# Altium footprint library cp-01.PcbLib: 47 footprints (part 1 of 3)
Each footprint in its own frame and in the unit in brackets; x right, y up, seen from the top. Pads: shape width x height; smd on the part's side, far side on the other; paste and mask are expansions set on the pad; w line width, h text height; cw(c..) or ccw(c..) is an arc to the next point about the centre after c.
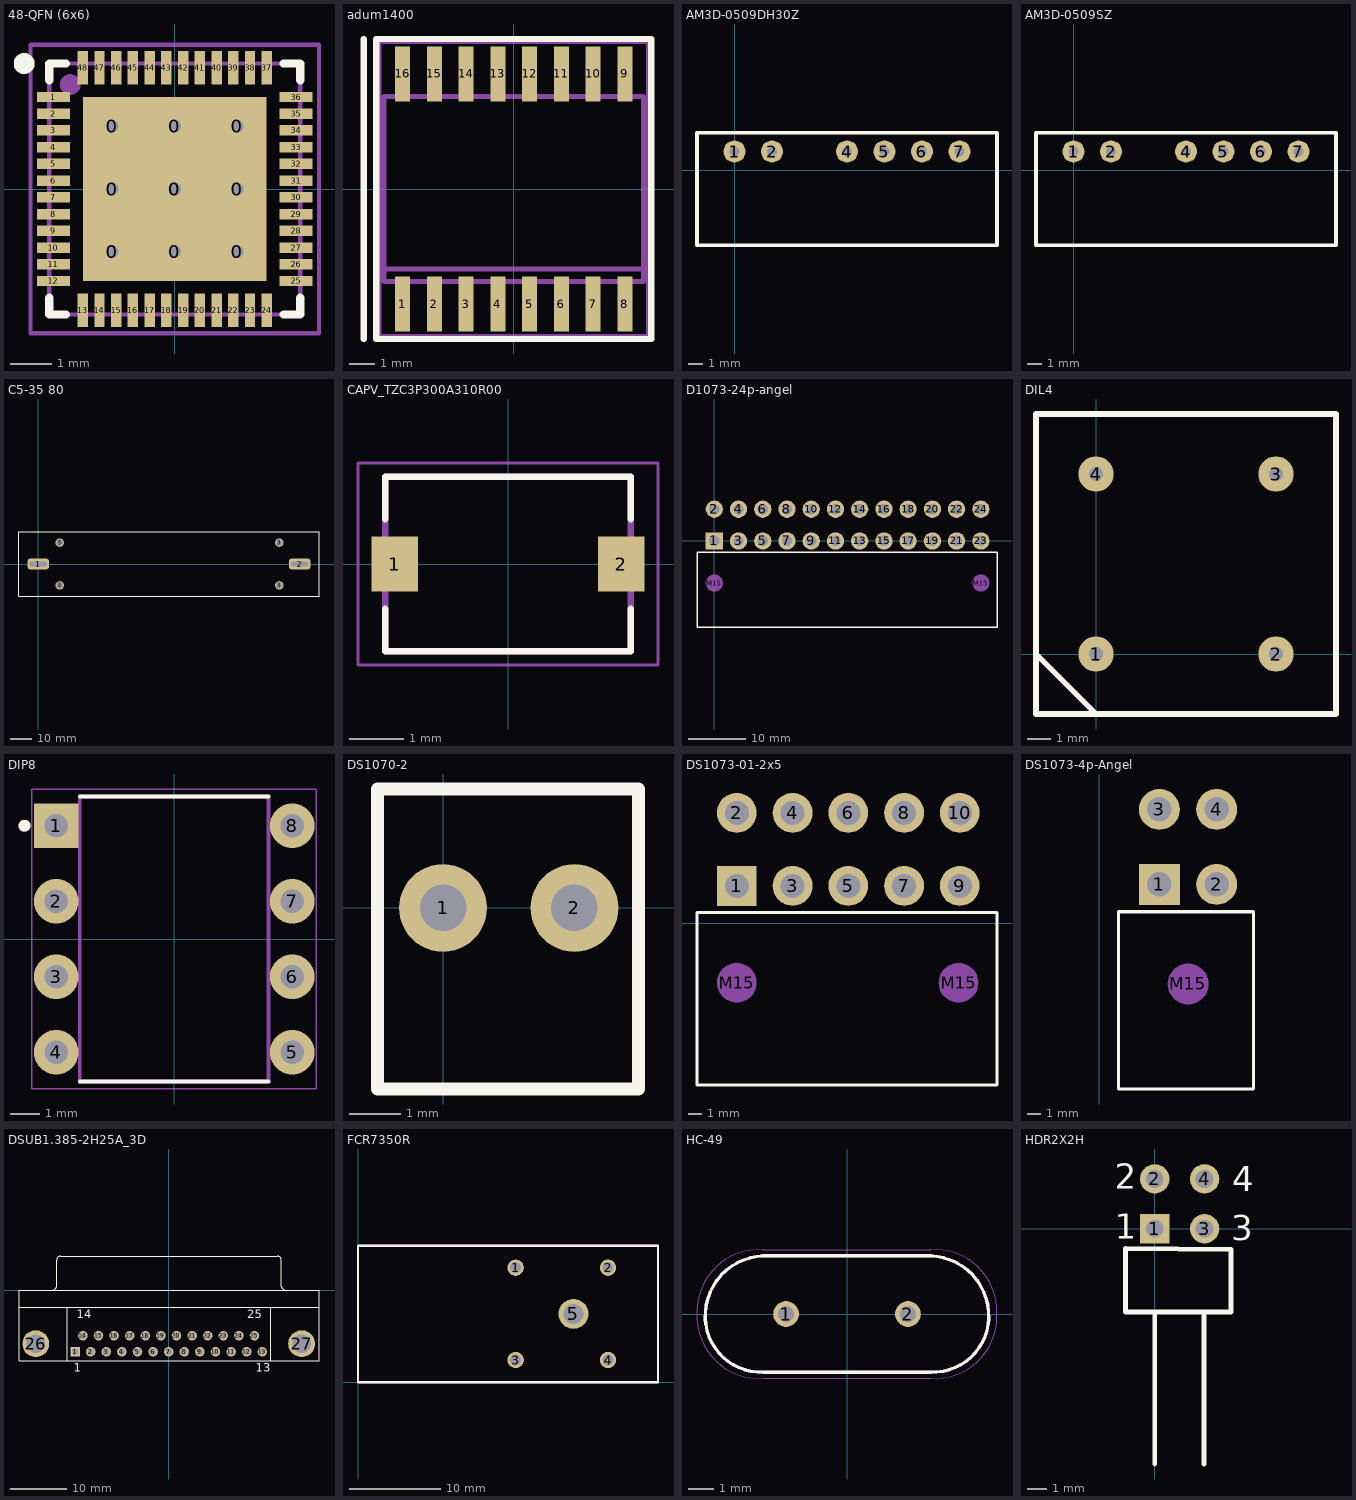
[diagram p0: the footprints below, top view; thin cyan lines are the x and y axes]

## 48-QFN (6x6) [mm] "6x6 mm, pitch 0.4 mm, power pad"
height 0.85
pads (59):
  round 0.7 hole 0.3: 0(-1.5,-1.5) 0(-1.5,0) 0(-1.5,1.5) 0(0,-1.5) 0(0,0) 0(0,1.5) 0(1.5,-1.5) 0(1.5,0) 0(1.5,1.5)
  rect 4.4x4.4 smd: 0(0,0)
  rect 0.8x0.25 smd: 1(-2.9,2.2) 2(-2.9,1.8) 3(-2.9,1.4) 4(-2.9,1) 5(-2.9,0.6) 6(-2.9,0.2) 7(-2.9,-0.2) 8(-2.9,-0.6) 9(-2.9,-1) 10(-2.9,-1.4) 11(-2.9,-1.8) 12(-2.9,-2.2) 25(2.9,-2.2) 26(2.9,-1.8) 27(2.9,-1.4) 28(2.9,-1) 29(2.9,-0.6) 30(2.9,-0.2) 31(2.9,0.2) 32(2.9,0.6) 33(2.9,1) 34(2.9,1.4) 35(2.9,1.8) 36(2.9,2.2)
  rect 0.25x0.8 smd: 13(-2.2,-2.9) 14(-1.8,-2.9) 15(-1.4,-2.9) 16(-1,-2.9) 17(-0.6,-2.9) 18(-0.2,-2.9) 19(0.2,-2.9) 20(0.6,-2.9) 21(1,-2.9) 22(1.4,-2.9) 23(1.8,-2.9) 24(2.2,-2.9) 37(2.2,2.9) 38(1.8,2.9) 39(1.4,2.9) 40(1,2.9) 41(0.6,2.9) 42(0.2,2.9) 43(-0.2,2.9) 44(-0.6,2.9) 45(-1,2.9) 46(-1.4,2.9) 47(-1.8,2.9) 48(-2.2,2.9)
  round 0.5 on Mech1 mask+0: ""(-2.5,2.5)
Top Overlay:
  circle w0.25: c-3.6,3 r0.125
  lines w0.2: -3,-2.6 -3,-3 -2.6,-3 ; -3,2.6 -3,3 -2.6,3 ; 2.6,-3 3,-3 3,-2.6 ; 2.6,3 3,3 3,2.6
Mechanical 1:
  lines w0.1: -3,-3 -3,3 3,3 3,-3 -3,-3
Mechanical 15:
  lines w0.1: -0.5,0 0.5,0 ; 0,-0.5 0,0.5 ; -3.45,-3.45 -3.45,3.45 3.45,3.45 3.45,-3.45 -3.45,-3.45
3D body "48-VFQFN (6x6).step": height 0.85, standoff 0, extent -3.02,-3.02 3.02,3.02

## adum1400 [mm]
pads (16):
  rect 0.6x2.2 smd: 1(-4.445,-4.6) 2(-3.175,-4.6) 3(-1.905,-4.6) 4(-0.635,-4.6) 5(0.635,-4.6) 6(1.905,-4.6) 7(3.175,-4.6) 8(4.445,-4.6) 9(4.445,4.6) 10(3.175,4.6) 11(1.905,4.6) 12(0.635,4.6) 13(-0.635,4.6) 14(-1.905,4.6) 15(-3.175,4.6) 16(-4.445,4.6)
Top Overlay:
  lines w0.254: -6,-6 -6,6 ; -5.5,-6 5.5,-6 5.5,6 -5.5,6 -5.5,-6
Mechanical 13:
  region: -4.2,-5.324 -4.694,-5.324 -4.694,-3.8 -4.2,-3.8
  region: -2.93,-5.328 -3.425,-5.328 -3.425,-3.8 -2.93,-3.8
  region: -1.66,-5.326 -2.153,-5.326 -2.153,-3.8 -1.66,-3.8
  region: -0.39,-5.328 -0.881,-5.328 -0.881,-3.8 -0.39,-3.8
  region: 0.88,-5.325 0.39,-5.325 0.39,-3.8 0.88,-3.8
  region: 2.15,-5.329 1.663,-5.329 1.663,-3.8 2.15,-3.8
  region: 3.42,-5.328 2.934,-5.328 2.934,-3.8 3.42,-3.8
  region: 4.69,-5.323 4.203,-5.323 4.203,-3.8 4.69,-3.8
  region: 4.69,3.807 4.208,3.807 4.208,5.32 4.69,5.32
  region: 3.42,3.807 2.935,3.807 2.935,5.32 3.42,5.32
  region: 2.15,3.807 1.663,3.807 1.663,5.32 2.15,5.32
  region: 0.88,3.805 0.39,3.805 0.39,5.32 0.88,5.32
  region: -0.39,3.805 -0.881,3.805 -0.881,5.32 -0.39,5.32
  region: -1.66,3.804 -2.152,3.804 -2.152,5.32 -1.66,5.32
  region: -2.93,3.8 -3.42,3.8 -3.42,5.32 -2.93,5.32
  region: -4.2,3.802 -4.693,3.802 -4.693,5.32 -4.2,5.32
  lines w0.203: -5.19,-3.2 -5.19,-3.7 5.19,-3.7 5.19,-3.2 ; -5.19,-3.2 -5.19,3.7 5.19,3.7 5.19,-3.2 ; -5.19,-3.2 5.19,-3.2
Mechanical 15:
  lines w0.2: -5.395,-5.9 5.395,-5.9 5.395,5.9 -5.395,5.9 -5.395,-5.9
3D body "ADUM1400.STEP": height 2.64, standoff 0, extent -6.4,-5.15 6.4,5.15

## AM3D-0509DH30Z [mm]
pads (6):
  round 1.5 hole 0.7: 1(0,1.27) 2(2.54,1.27) 4(7.62,1.27) 5(10.16,1.27) 6(12.7,1.27) 7(15.24,1.27)
Top Overlay:
  lines w0.254: -2.54,-5.08 -2.54,2.54 17.78,2.54 17.78,-5.08 -2.54,-5.08

## AM3D-0509SZ [mm]
pads (6):
  round 1.5 hole 0.7: 1(0,1.27) 2(2.54,1.27) 4(7.62,1.27) 5(10.16,1.27) 6(12.7,1.27) 7(15.24,1.27)
Top Overlay:
  lines w0.254: -2.54,-5.08 -2.54,2.54 17.78,2.54 17.78,-5.08 -2.54,-5.08

## C5-35 80 [mm]
pads (6):
  rrect50% 10x5 hole 2 slot 8 at 0 deg: 1(0,0) 2(122,0)
  round 4 hole 3.2: 3(10,-10) 3(10,10) 3(112.5,-10) 3(112.5,10)
Top Overlay:
  lines w0.254: -9,-15 131,-15 131,15 -9,15 -9,-15
3D body "С5-35В 80 1.stp": height 30, standoff -15, extent -9,-15 131,15

## CAPV_TZC3P300A310R00 [mm]
pads (2):
  rect 0.85x1 smd: 1(-2.075,0) 2(2.075,0)
Top Overlay:
  lines w0.127: -2.25,-0.82 -2.25,-1.6 2.25,-1.6 2.25,-0.82 ; -2.25,0.82 -2.25,1.6 2.25,1.6 2.25,0.82
Mechanical 13:
  lines w0.127: -2.25,-1.6 2.25,-1.6 2.25,1.6 -2.25,1.6 -2.25,-1.6
Mechanical 15:
  lines w0.05: -2.75,-1.85 -2.75,1.85 2.75,1.85 2.75,-1.85 -2.75,-1.85
3D body "User Library-TZC3P300A110R00.STEP": height 1.6, standoff 0, extent -2.25,-1.6 2.25,1.6

## D1073-24p-angel [mm]
pads (26):
  rect 3x3 hole 1.8: 1(0,0)
  round 3 hole 1.8: 2(0,5.5) 3(4.2,0) 4(4.2,5.5) 5(8.4,0) 6(8.4,5.5) 7(12.6,0) 8(12.6,5.5) 9(16.8,0) 10(16.8,5.5) 11(21,0) 12(21,5.5) 13(25.2,0) 14(25.2,5.5) 15(29.4,0) 16(29.4,5.5) 17(33.6,0) 18(33.6,5.5) 19(37.8,0) 20(37.8,5.5) 21(42,0) 22(42,5.5) 23(46.2,0) 24(46.2,5.5)
  round 3 on Mech13: M15(0,-7.3) M15(46.2,-7.3)
Top Overlay:
  lines w0.254: -3,-15 49,-15 49,-2 -3,-2 -3,-15
3D body "026013126.stp": height 11.4, standoff -3.6, extent -2.7,-13.735 49.3,6.2

## DIL4 [mm]
pads (4):
  round 1.5 hole 0.6: 1(0,0) 2(7.62,0) 3(7.62,7.62) 4(0,7.62)
Top Overlay:
  lines w0.254: -2.54,0 0,-2.54 ; -2.54,-2.54 -2.54,10.16 10.16,10.16 10.16,-2.54 -2.54,-2.54

## DIP8 [mm]
pads (8):
  rect 1.5x1.5 hole 0.78: 1(-3.97,3.81)
  round 1.5 hole 0.78: 2(-3.97,1.27) 3(-3.97,-1.27) 4(-3.97,-3.81) 5(3.97,-3.81) 6(3.97,-1.27) 7(3.97,1.27) 8(3.97,3.81)
Top Overlay:
  circle w0.2: c-5.035,3.81 r0.1
  lines w0.127: -3.175,-4.795 3.175,-4.795 ; -3.175,4.795 3.175,4.795
Mechanical 13:
  circle w0.2: c-5.035,3.81 r0.1
  lines w0.127: -3.175,-4.795 3.175,-4.795 3.175,4.795 -3.175,4.795 -3.175,-4.795
Mechanical 15:
  lines w0.05: -4.785,-5.045 4.785,-5.045 4.785,5.045 -4.785,5.045 -4.785,-5.045
3D body "DIP8.STEP": height 6.08, standoff -2.81, extent -3.937,-4.819 3.937,4.769

## DS1070-2 [mm]
pads (2):
  round 1.7 hole 0.9: 1(0,0) 2(2.54,0)
Top Overlay:
  lines w0.254: -1.265,-3.5 -1.265,2.3 3.775,2.3 3.775,-3.5 -1.265,-3.5
3D body "User Library-DS1070-2 (WF-2 CONNFLY).STEP": height 11.4, standoff -3.3, extent -1.24,-3.5 3.84,2.4

## DS1073-01-2x5 [mm]
pads (12):
  rect 3x3 hole 1.8: 1(-28.8,2.8)
  round 3 hole 1.8: 2(-28.8,8.3) 3(-24.6,2.8) 4(-24.6,8.3) 5(-20.4,2.8) 6(-20.4,8.3) 7(-16.2,2.8) 8(-16.2,8.3) 9(-12,2.8) 10(-12,8.3)
  round 3 on Mech13: M15(-28.8,-4.5) M15(-12.1,-4.5)
Top Overlay:
  lines w0.254: -31.8,-12.2 -9.2,-12.2 -9.2,0.8 -31.8,0.8 -31.8,-12.2
3D body "DS1073-01-2x5.stp": height 10, standoff -3.6, extent -31.5,-11.267 -9.7,8.667

## DS1073-4p-Angel [mm]
pads (5):
  rect 3x3 hole 1.8: 1(4.4,-8.5)
  round 3 hole 1.8: 2(8.6,-8.5) 3(4.4,-3) 4(8.6,-3)
  round 3 on Mech13: M15(6.5,-15.8)
Top Overlay:
  lines w0.254: 1.4,-23.5 11.3,-23.5 11.3,-10.5 1.4,-10.5 1.4,-23.5
3D body "026013128.stp": height 11.4, standoff -3.6, extent 1.7,-22.367 11.7,-2.433

## DSUB1.385-2H25A_3D [mm] "Connector; D Subminiature; 25 Position; Right Angle; Pitch 1.385 mm"
height 12.93
pads (27):
  rect 1.69x1.69 hole 1.09: 1(-16.566,-10.92)
  round 1.69 hole 1.09: 2(-13.805,-10.92) 3(-11.044,-10.92) 4(-8.283,-10.92) 5(-5.522,-10.92) 6(-2.761,-10.92) 7(0,-10.92) 8(2.761,-10.92) 9(5.522,-10.92) 10(8.283,-10.92) 11(11.044,-10.92) 12(13.805,-10.92) 13(16.566,-10.92) 14(-15.185,-8.08) 15(-12.424,-8.08) 16(-9.663,-8.08) 17(-6.902,-8.08) 18(-4.141,-8.08) 19(-1.38,-8.08) 20(1.381,-8.08) 21(4.142,-8.08) 22(6.903,-8.08) 23(9.664,-8.08) 24(12.425,-8.08) 25(15.186,-8.08)
  round 4.76 hole 3.26: 26(-23.526,-9.5) 27(23.526,-9.5)
Top Overlay:
  lines w0.2: -26.496,-3 26.604,-3 ; -20.541,0.005 ccw(c-20.541,0.7) -19.846,0.7 -19.846,5.3 ; -19.841,5.305 cw(c-19.146,5.305) -19.146,6 19.254,6 cw(c19.254,5.305) 19.949,5.305 ; -17.946,-12.5 -17.946,-3 ; 18.054,-12.5 18.054,-3 ; 19.954,5.3 19.954,0.7 ccw(c20.649,0.7) 20.649,0.005 ; -26.496,-12.5 26.604,-12.5 26.604,0 -26.496,0 -26.496,-12.5
  text "1" at -16.816,-14.475 h1.5
  text "13" at 15.441,-14.475 h1.5
  text "14" at -16.31,-4.975 h1.5
  text "25" at 13.936,-4.975 h1.5
3D body "618025231221.stp": height 12.27, standoff -4.27, extent -26.5,-12.5 26.6,5.9

## FCR7350R [mm]
pads (5):
  round 1.8 hole 1.2: 1(17.34,12.604) 2(27.5,12.604) 3(17.34,2.444) 4(27.5,2.444)
  round 3.3 hole 2.2: 5(23.7,7.524)
Top Overlay:
  lines w0.254: 0,0 33,0 33,15.015 0,15.015 0,0
Mechanical 13:
  lines w0.254: 0,0 0,15.015 33,15.015 33,0 0,0
3D body "FCR7350R--3DModel-STEP-56544.STEP": height 11.5, standoff -3.4, extent -3.82,1.5 29.18,13.5

## HC-49 [mm]
pads (2):
  round 1.03 hole 0.63: 1(-2.44,0) 2(2.44,0)
Top Overlay:
  lines w0.127: -5.675,-0.169 cw(c-3.26,-0.085) -3.344,2.33 ; -5.675,-0.168 ccw(c-3.435,-0.09) -3.357,-2.33 ; -3.35,-2.33 3.35,-2.33 ; -3.35,2.33 3.35,2.33 ; 3.344,2.33 cw(c3.26,-0.085) 5.675,-0.169 ; 3.357,-2.33 ccw(c3.435,-0.09) 5.675,-0.168
Mechanical 13:
  lines w0.127: -5.675,-0.169 cw(c-3.26,-0.085) -3.344,2.33 ; -5.675,-0.168 ccw(c-3.435,-0.09) -3.357,-2.33 ; -3.35,-2.33 3.35,-2.33 ; -3.35,2.33 3.35,2.33 ; 3.344,2.33 cw(c3.26,-0.085) 5.675,-0.169 ; 3.357,-2.33 ccw(c3.435,-0.09) 5.675,-0.168
Mechanical 15:
  lines w0.05: -5.999,-0.264 ccw(c-3.51,-0.09) -3.336,-2.579 ; -6,-0.25 -6,0.25 ; -5.999,0.264 cw(c-3.51,0.09) -3.336,2.579 ; -3.35,-2.58 3.35,-2.58 ; -3.35,2.58 3.35,2.58 ; 3.336,-2.579 ccw(c3.51,-0.09) 5.999,-0.264 ; 3.336,2.579 cw(c3.51,0.09) 5.999,0.264 ; 6,-0.25 6,0.25
3D body "HC-49.STEP": height 13.56, standoff -12.6, extent -5.7,-2.5 5.65,2.5

## HDR2X2H [mm] "Connector; Header; 10x2 Position; Right Angle"
pads (4):
  rect 1.5x1.5 hole 0.9: 1(0,0)
  round 1.5 hole 0.9: 2(0,2.54) 3(2.54,0) 4(2.54,2.54)
Top Overlay:
  lines w0.254: 0,-12 0,-4.25 ; 2.5,-12 2.5,-4.25 ; -1.5,-4.25 3.9,-4.25 3.9,-1.052 -1.5,-1 -1.5,-4.25
  text "1" at -2.032,-0.508 h1.27
  text "2" at -2.032,2.032 h1.27
  text "3" at 3.9,-0.6 h1.27
  text "4" at 3.95,1.9 h1.27
3D body "2x2 Male Pin Header Angle.STEP": height 3, standoff -5, extent -1.285,-11.95 3.8,2.95